# Altium schematic symbol library C0402C101J1GACAUTO.SchLib: 1 symbol
Pins are listed as number, name and electrical type; pins without a type are passive.

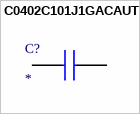
[diagram p0: symbol C0402C101J1GACAUTO]

## C0402C101J1GACAUTO
designator C?
100 pF ±5% 100V Ceramic Capacitor C0G, NP0 0402 (1005 Metric); MF: {'manufacturer': u'KEMET'}; MP: C0402C101J1GACAUTO; Package: None; Price: None; Value: *; Availability: Unavailable
footprint CAPC1005X55N
pins: 1, 2